# EAGLE library part TPS61023 (library madhu)
Texas Instruments TPS61023 3.7-A Boost Converter with 0.5-V Ultra-low Input Voltage datasheet <https://www.ti.com/lit/ds/symlink/tps61023.pdf>
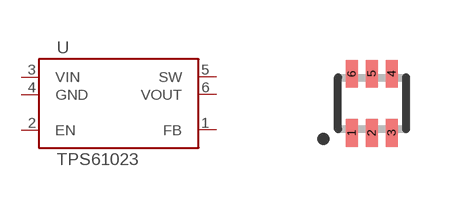
[diagram p33: symbol with the pads of SOT563; footprint SOT563]

Designator prefix U

## TPS61023  [SOT563]
1  FB  in
2  EN  in
3  VIN  pwr
4  GND  pwr
5  SW  pwr
6  VOUT  out

## Footprint SOT563 (pad centres in mm)
Small Outline Transistor; 6 leads Reflow soldering DIODES, https://www.diodes.com/assets/Package-Files/SOT563.pdf
smd 0.3 x 0.7: 1 -0.5,-0.74; 2 0,-0.74; 3 0.5,-0.74; 4 0.5,0.74; 5 0,0.74; 6 -0.5,0.74